# Altium footprint library IND_MSS1048-223MLB.PcbLib: 1 footprints
Each footprint in its own frame and in the unit in brackets; x right, y up, seen from the top. Pads: shape width x height; smd on the part's side, far side on the other; paste and mask are expansions set on the pad; w line width, h text height; cw(c..) or ccw(c..) is an arc to the next point about the centre after c.
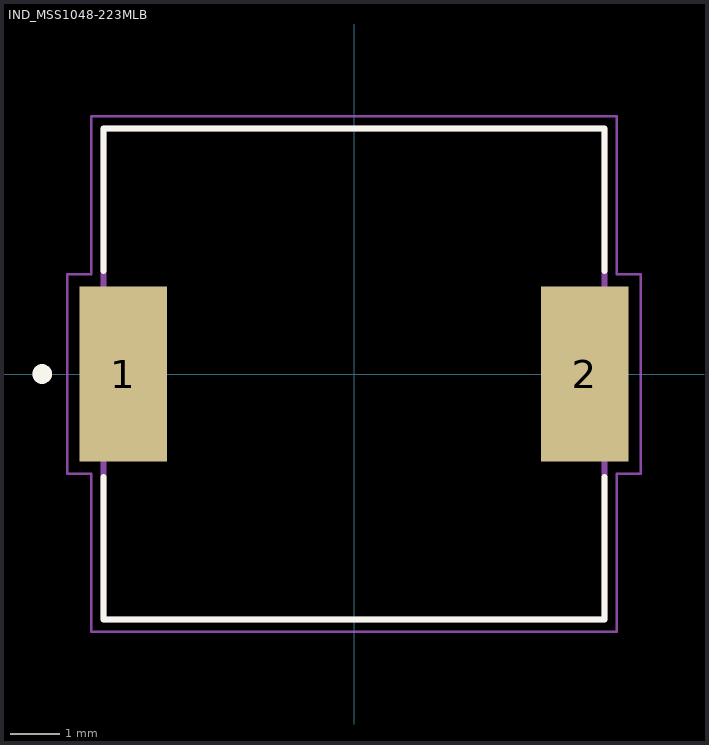
[diagram p0: the footprint, top view; thin cyan lines are the x and y axes]

## IND_MSS1048-223MLB [mm]
pads (2):
  rect 1.78x3.56 smd: 1(-4.7,0) 2(4.7,0)
Top Overlay:
  circle w0.2: c-6.35,0 r0.1
  lines w0.127: -5.1,-2.1 -5.1,-5 5.1,-5 5.1,-2.1 ; -5.1,2.1 -5.1,5 5.1,5 5.1,2.1
Assembly Top:
  circle w0.2: c-6.35,0 r0.1
  lines w0.127: -5.1,-5 -5.1,5 5.1,5 5.1,-5 -5.1,-5
Courtyard Top:
  lines w0.05: -5.84,-2.03 -5.84,2.03 -5.35,2.03 -5.35,5.25 5.35,5.25 5.35,2.03 5.84,2.03 5.84,-2.03 5.35,-2.03 5.35,-5.25 -5.35,-5.25 -5.35,-2.03 -5.84,-2.03